# Altium footprint library LimeMicroAltiumLib.PcbLib: 876 footprints (part 50 of 57)
Each footprint in its own frame and in the unit in brackets; x right, y up, seen from the top. Pads: shape width x height; smd on the part's side, far side on the other; paste and mask are expansions set on the pad; w line width, h text height; cw(c..) or ccw(c..) is an arc to the next point about the centre after c.
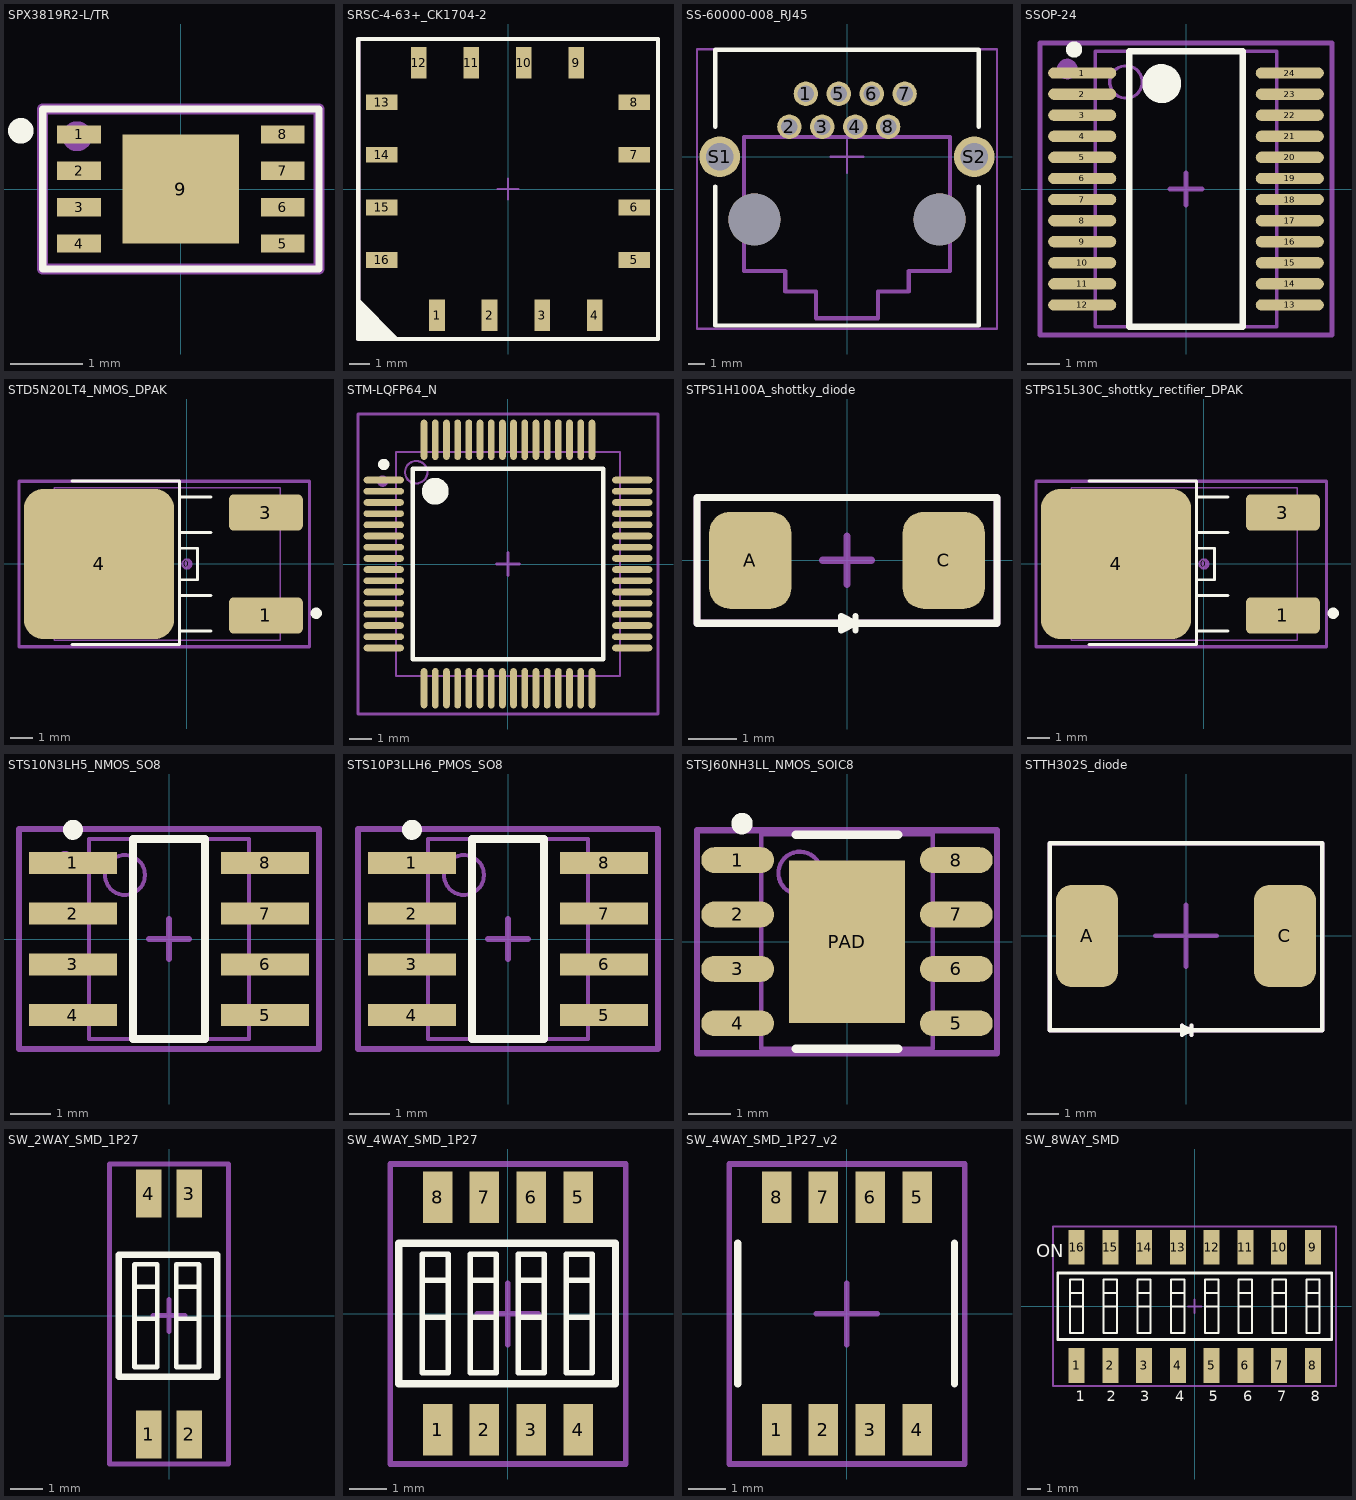
[diagram p49: the footprints below, top view; thin cyan lines are the x and y axes]

## SPX3819R2-L/TR [mm]
pads (9):
  rect 0.6x0.25 smd mask+0.05: 1(-1.4,0.75) 2(-1.4,0.25) 3(-1.4,-0.25) 4(-1.4,-0.75) 5(1.4,-0.75) 6(1.4,-0.25) 7(1.4,0.25) 8(1.4,0.75)
  rect 1.6x1.5 smd: 9(0,0)
Top Overlay:
  circle w0.3: c-2.2,0.8 r0.025
  lines w0.1: -1.9,-1.1 -1.9,1.1 1.9,1.1 1.9,-1.1 -1.9,-1.1
Mechanical 15:
  circle w0.3: c-1.425,0.725 r0.056
  lines w0.15: -0.25,0 0,0 ; 0,-0.25 0,0 ; 0,0.25 0,0 ; 0.25,0 0,0 ; -1.9,-1.1 1.9,-1.1 1.9,1.1 -1.9,1.1 -1.9,-1.1
  text ".Designator" at 0,0 h0.55
3D body "User Library-DFN-8 DCB.step": height 0.75, standoff 0, extent -1.51,-1 1.51,1

## SRSC-4-63+_CK1704-2 [mm]
pads (16):
  rect 0.76x1.52 smd: 1(-3.43,-6.1) 2(-0.89,-6.1) 3(1.65,-6.1) 4(4.19,-6.1) 9(3.3,6.1) 10(0.76,6.1) 11(-1.78,6.1) 12(-4.32,6.1)
  rect 1.52x0.76 smd: 5(6.1,-3.43) 6(6.1,-0.89) 7(6.1,1.65) 8(6.1,4.19) 13(-6.1,4.19) 14(-6.1,1.65) 15(-6.1,-0.89) 16(-6.1,-3.43)
Top Overlay:
  region: -5.25,-7.25 -7.25,-5.25 -7.25,-7.25
  lines w0.2: -7.24,-7.25 -7.24,7.25 7.25,7.25 7.25,-7.25 -7.24,-7.25
Mechanical 15:
  circle w0.254: c-3.5,-6 r0.056
  lines w0.1: -0.5,0 0,0 ; 0,-0.5 0,0 ; 0,0.5 0,0 ; 0.5,0 0,0
  lines w0.2: -7.24,-7.25 7.25,-7.25 7.25,7.25 -7.24,7.25 -7.24,-7.25
  text ".Designator" at 0,0 h0.55
3D body "User Library-ROS-425-319 in CK605 case detailed.STEP": height 4.57, standoff 0, extent -6.35,-6.35 6.35,6.35

## SS-60000-008_RJ45 [mm]
pads (12):
  round 1.5 hole 1: 1(-2.54,3.873) 2(-3.556,1.841) 3(-1.524,1.841) 4(0.508,1.841) 5(-0.508,3.873) 6(1.524,3.873) 7(3.556,3.873) 8(2.54,1.841)
  round 2.515 hole 1.7: S1(-7.849,-0.013) S2(7.849,-0.013)
  round 3.2 hole 3.2 unplated: ""(-5.715,-3.873) ""(5.715,-3.873)
Top Overlay:
  lines w0.254: -8.128,-1.841 -8.128,-10.427 8.128,-10.427 8.128,-1.841 ; -8.128,1.841 -8.128,6.591 8.128,6.591 8.128,1.841
Mechanical 13:
  lines w0.254: -6.35,-7.048 -6.35,1.206 6.35,1.206 6.35,-7.048 3.81,-7.048 3.81,-8.319 1.905,-8.319 1.905,-9.97 -1.905,-9.97 -1.905,-8.319 -3.81,-8.319 -3.81,-7.048 -6.35,-7.048
Mechanical 15:
  lines w0.15: -1,0 0,0 ; 0,-1 0,0 ; 0,1 0,0 ; 1,0 0,0 ; -9.25,-10.623 -9.25,6.626 9.25,6.626 9.25,-10.623 -9.25,-10.623
  text ".Designator" at 0,0 h0.55
3D body "SS-60000-008.stp": height 16.62, standoff -3.96, extent -8.001,-10.365 8.001,6.374

## SSOP-24 [mm] "SOP, 24-Leads, Body 8,5x5,6mm (max), Pitch 0,65mm, IPC Medium Density"
height 2
pads (24):
  oval 2.1x0.35 smd: 1(-3.2,3.575) 2(-3.2,2.925) 3(-3.2,2.275) 4(-3.2,1.625) 5(-3.2,0.975) 6(-3.2,0.325) 7(-3.2,-0.325) 8(-3.2,-0.975) 9(-3.2,-1.625) 10(-3.2,-2.275) 11(-3.2,-2.925) 12(-3.2,-3.575) 13(3.2,-3.575) 14(3.2,-2.925) 15(3.2,-2.275) 16(3.2,-1.625) 17(3.2,-0.975) 18(3.2,-0.325) 19(3.2,0.325) 20(3.2,0.975) 21(3.2,1.625) 22(3.2,2.275) 23(3.2,2.925) 24(3.2,3.575)
Top Overlay:
  circle w0.25: c-3.45,4.3 r0.125
  circle w0.6: c-0.75,3.25 r0.3
  lines w0.2: -1.75,-4.25 -1.75,4.25 1.75,4.25 1.75,-4.25 -1.75,-4.25
Mechanical 13:
  circle w0.1: c-1.85,3.3 r0.5
  lines w0.1: -2.8,-4.25 -2.8,4.25 2.8,4.25 2.8,-4.25 -2.8,-4.25
Mechanical 15:
  circle w0.35: c-3.659,3.7 r0.141
  lines w0.15: -0.5,0 0.5,0 ; 0,-0.5 0,0.5 ; -4.5,-4.5 -4.5,4.5 4.5,4.5 4.5,-4.5 -4.5,-4.5
  text ".designator" at 0,0 h0.55
3D body "SOP65P640X110-24N.STEP": height 1.2, standoff 0, extent -3.25,-3.95 3.25,3.95

## STD5N20LT4_NMOS_DPAK [mm] "D-PAK/TO-263-3; 3 Leads (1 Cropped); Body 14.7 (inc. leads) x 10.2 mm (LxW max)"
height 4.572
pads (4):
  round 0.508 on Mech15: 0(0,0)
  rrect25% 3.3x1.6 smd: 1(3.526,-2.3) 3(3.526,2.3)
  rrect25% 6.7x6.7 smd: 4(-3.926,0)
Top Overlay:
  circle w0.25: c5.774,-2.2 r0.125
  lines w0.127: -5.126,-3.6 -0.326,-3.6 -0.326,3.7 -5.126,3.7 ; 1.074,-3 -0.326,-3 -0.326,-1.4 1.074,-1.4 ; 1.074,1.4 -0.326,1.4 -0.326,3 1.074,3 ; -0.326,-0.7 0.474,-0.7 0.474,0.7 -0.326,0.7 -0.326,-0.7
Mechanical 13:
  lines w0.076: -5.928,-3.4 -5.928,3.4 4.174,3.4 4.174,-3.4 -5.928,-3.4
Mechanical 15:
  circle w0.3: c3.674,-2.2 r0.1
  lines w0.15: -7.5,-3.7 5.474,-3.7 5.474,3.7 -7.5,3.7 -7.5,-3.7
  text ".Designator" at 0,0 h0.55
3D body "User Library-DPAK_TO-252AA.step": height 2.37, standoff -0.03, extent -5.928,-3.367 4.172,3.367

## STM-LQFP64_N [mm] "Thin QFP, 64-Leads, Body 10x10mm, Pitch 0.5mm, IPC Medium Density"
height 1.6
pads (64):
  oval 1.8x0.3 smd mask+0.05: 1(-5.55,3.75) 2(-5.55,3.25) 3(-5.55,2.75) 4(-5.55,2.25) 5(-5.55,1.75) 6(-5.55,1.25) 7(-5.55,0.75) 8(-5.55,0.25) 9(-5.55,-0.25) 10(-5.55,-0.75) 11(-5.55,-1.25) 12(-5.55,-1.75) 13(-5.55,-2.25) 14(-5.55,-2.75) 15(-5.55,-3.25) 16(-5.55,-3.75) 33(5.55,-3.75) 34(5.55,-3.25) 35(5.55,-2.75) 36(5.55,-2.25) 37(5.55,-1.75) 38(5.55,-1.25) 39(5.55,-0.75) 40(5.55,-0.25) 41(5.55,0.25) 42(5.55,0.75) 43(5.55,1.25) 44(5.55,1.75) 45(5.55,2.25) 46(5.55,2.75) 47(5.55,3.25) 48(5.55,3.75)
  oval 0.3x1.8 smd mask+0.05: 17(-3.75,-5.55) 18(-3.25,-5.55) 19(-2.75,-5.55) 20(-2.25,-5.55) 21(-1.75,-5.55) 22(-1.25,-5.55) 23(-0.75,-5.55) 24(-0.25,-5.55) 25(0.25,-5.55) 26(0.75,-5.55) 27(1.25,-5.55) 28(1.75,-5.55) 29(2.25,-5.55) 30(2.75,-5.55) 31(3.25,-5.55) 32(3.75,-5.55) 49(3.75,5.55) 50(3.25,5.55) 51(2.75,5.55) 52(2.25,5.55) 53(1.75,5.55) 54(1.25,5.55) 55(0.75,5.55) 56(0.25,5.55) 57(-0.25,5.55) 58(-0.75,5.55) 59(-1.25,5.55) 60(-1.75,5.55) 61(-2.25,5.55) 62(-2.75,5.55) 63(-3.25,5.55) 64(-3.75,5.55)
Top Overlay:
  circle w0.6: c-3.25,3.25 r0.3
  circle w0.25: c-5.55,4.45 r0.125
  lines w0.2: -4.25,-4.25 4.25,-4.25 4.25,4.25 -4.25,4.25 -4.25,-4.25
Mechanical 13:
  circle w0.1: c-4.1,4.1 r0.5
  lines w0.1: -5,-5 5,-5 5,5 -5,5 -5,-5
Mechanical 15:
  circle w0.25: c-5.6,3.7 r0.125
  lines w0.15: -0.5,0 0.5,0 ; 0,-0.5 0,0.5 ; -6.7,-6.7 6.7,-6.7 6.7,6.7 -6.7,6.7 -6.7,-6.7
  text ".Designator" at 0,0 h0.55
3D body "LQFP-64.STEP": height 1.6, standoff 0, extent -6,-6 6,6

## STPS1H100A_shottky_diode [mm]
pads (2):
  rrect50% 1.7x2 smd mask+0.05: A(-2,0) C(2,0)
Top Overlay:
  lines w0.127: -0.125,-1.3 0.175,-1.3 ; 0.175,-1.45 0.175,-1.15 ; 0.175,-1.3 -0.125,-1.45 -0.125,-1.15 0.175,-1.3
  lines w0.15: -3.1,-1.3 3.1,-1.3 3.1,1.3 -3.1,1.3 -3.1,-1.3
Mechanical 15:
  lines w0.15: -0.5,0 0,0 ; 0,-0.5 0,0 ; 0,0.5 0,0 ; 0.5,0 0,0 ; -3.1,-1.3 3.1,-1.3 3.1,1.3 -3.1,1.3 -3.1,-1.3
  text ".Designator" at -0.2,-0.2 h0.55
  text "C" at 1.7,-0.4 h0.55
  text "A" at -2.4,-0.5 h0.55
3D body "User Library-Diode Molded Body.step": height 2.89, standoff -0.03, extent -2.65,-1.3 2.65,1.3

## STPS15L30C_shottky_rectifier_DPAK [mm] "D-PAK/TO-263-3; 3 Leads (1 Cropped); Body 14.7 (inc. leads) x 10.2 mm (LxW max)"
height 4.572
pads (4):
  round 0.508 on Mech15: 0(0,0)
  rrect25% 3.3x1.6 smd: 1(3.526,-2.3) 3(3.526,2.3)
  rrect25% 6.7x6.7 smd: 4(-3.926,0)
Top Overlay:
  circle w0.25: c5.774,-2.2 r0.125
  lines w0.127: -5.126,-3.6 -0.326,-3.6 -0.326,3.7 -5.126,3.7 ; 1.074,-3 -0.326,-3 -0.326,-1.4 1.074,-1.4 ; 1.074,1.4 -0.326,1.4 -0.326,3 1.074,3 ; -0.326,-0.7 -0.326,0.7 0.474,0.7 0.474,-0.7 -0.326,-0.7
Mechanical 13:
  lines w0.076: -5.928,-3.4 4.174,-3.4 4.174,3.4 -5.928,3.4 -5.928,-3.4
Mechanical 15:
  circle w0.3: c3.674,-2.2 r0.1
  lines w0.15: -7.5,-3.7 -7.5,3.7 5.474,3.7 5.474,-3.7 -7.5,-3.7
  text ".Designator" at 0,0 h0.55
3D body "User Library-DPAK_TO-252AA.step": height 2.37, standoff -0.03, extent -5.928,-3.367 4.172,3.367

## STS10N3LH5_NMOS_SO8 [mm] "SOIC, 8-Leads, Body 4,90x3,90mm, Pitch 1,27mm, IPC Medium Density"
height 1.7
pads (8):
  rect 2.2x0.55 smd: 1(-2.4,1.905) 2(-2.4,0.635) 3(-2.4,-0.635) 4(-2.4,-1.905) 5(2.4,-1.905) 6(2.4,-0.635) 7(2.4,0.635) 8(2.4,1.905)
Top Overlay:
  circle w0.25: c-2.4,2.73 r0.125
  lines w0.2: -0.9,-2.5 -0.9,2.5 0.9,2.5 0.9,-2.5 -0.9,-2.5
Mechanical 13:
  circle w0.1: c-1.1,1.6 r0.5
  lines w0.1: -2,-2.5 -2,2.5 2,2.5 2,-2.5 -2,-2.5
Mechanical 15:
  circle w0.2: c-2.6,2 r0.1
  lines w0.15: -0.5,0 0.5,0 ; 0,-0.5 0,0.5 ; -3.75,-2.75 -3.75,2.75 3.75,2.75 3.75,-2.75 -3.75,-2.75
  text ".Designator" at 0,0 h0.55
3D body "CircuitWorks-SO-8.step": height 1.45, standoff 0, extent -2.889,-2.45 2.889,2.452

## STS10P3LLH6_PMOS_SO8 [mm] "SOIC, 8-Leads, Body 4,90x3,90mm, Pitch 1,27mm, IPC Medium Density"
height 1.7
pads (8):
  rect 2.2x0.55 smd: 1(-2.4,1.905) 2(-2.4,0.635) 3(-2.4,-0.635) 4(-2.4,-1.905) 5(2.4,-1.905) 6(2.4,-0.635) 7(2.4,0.635) 8(2.4,1.905)
Top Overlay:
  circle w0.25: c-2.4,2.73 r0.125
  lines w0.2: -0.9,-2.5 -0.9,2.5 0.9,2.5 0.9,-2.5 -0.9,-2.5
Mechanical 13:
  circle w0.1: c-1.1,1.6 r0.5
  lines w0.1: -2,-2.5 -2,2.5 2,2.5 2,-2.5 -2,-2.5
Mechanical 15:
  circle w0.2: c-2.5,1.9 r0.1
  lines w0.15: -0.5,0 0.5,0 ; 0,-0.5 0,0.5 ; -3.75,-2.75 -3.75,2.75 3.75,2.75 3.75,-2.75 -3.75,-2.75
  text ".Designator" at 0,0 h0.55
3D body "CircuitWorks-SO-8.step": height 1.45, standoff 0, extent -2.889,-2.45 2.889,2.452

## STSJ60NH3LL_NMOS_SOIC8 [mm] "8-Pin Small Outline Integrated Circuit 1.27 mm Pitch"
height 1.55
pads (9):
  oval 1.7x0.6 smd mask+0.05: 1(-2.55,1.905) 2(-2.55,0.635) 3(-2.55,-0.635) 4(-2.55,-1.905) 5(2.55,-1.905) 6(2.55,-0.635) 7(2.55,0.635) 8(2.55,1.905)
  rect 2.7x3.8 smd mask+0.05: PAD(0,0)
Top Overlay:
  circle w0.25: c-2.45,2.755 r0.125
  lines w0.2: -1.2,-2.5 1.2,-2.5 ; -1.2,2.5 1.2,2.5
Mechanical 13:
  circle w0.1: c-1.1,1.6 r0.5
  lines w0.1: -2,-2.5 2,-2.5 2,2.5 -2,2.5 -2,-2.5
Mechanical 15:
  circle w0.35: c-2.6,1.9 r0.1
  lines w0.15: -0.5,0 0.5,0 ; 0,-0.5 0,0.5 ; -3.5,-2.6 3.5,-2.6 3.5,2.6 -3.5,2.6 -3.5,-2.6
  text ".Designator" at 0,0 h0.55
3D body "SOIC-8.STEP": height 1.75, standoff 0, extent -3,-2.45 3,2.45

## STTH302S_diode [mm]
pads (2):
  rrect50% 2x3.3 smd mask+0.05: A(-3.2,0) C(3.2,0)
Top Overlay:
  lines w0.127: -0.125,-3.05 0.175,-3.05 ; 0.175,-3.2 0.175,-2.9 ; 0.175,-3.05 -0.125,-3.2 -0.125,-2.9 0.175,-3.05
  lines w0.15: -4.4,-3.05 4.4,-3.05 4.4,3 -4.4,3 -4.4,-3.05
Mechanical 15:
  lines w0.127: -0.125,-3.05 0.175,-3.05 ; 0.175,-3.2 0.175,-2.9 ; 0.175,-3.05 -0.125,-2.9 -0.125,-3.2 0.175,-3.05
  lines w0.15: -1,0 0,0 ; 0,-1 0,0 ; 0,1 0,0 ; 1,0 0,0 ; -4.4,-3.05 4.4,-3.05 4.4,3 -4.4,3 -4.4,-3.05
  text "C" at 2.9,-0.5 h0.55
  text "A" at -3.5,-0.5 h0.55
  text ".Designator" at 0,0 h0.55
3D body "User Library-DO-214AB SMC.step": height 2.3, standoff 0, extent -3.975,-2.95 3.975,2.95

## SW_2WAY_SMD_1P27 [mm] "DIP Switch; 16 Leads, 1.27 pitch"
height 5.06
pads (4):
  rect 0.8x1.5 smd: 1(-0.635,-3.7) 2(0.635,-3.7) 3(0.635,3.8) 4(-0.635,3.8)
Top Overlay:
  lines w0.15: -1.075,-0.1 -0.365,-0.1 ; -1.075,0.9 -0.365,0.9 ; 0.225,-0.1 0.935,-0.1 ; 0.225,0.9 0.935,0.9 ; -1.075,-1.6 -1.075,1.6 -0.365,1.6 -0.365,-1.6 -1.075,-1.6 ; 0.225,-1.6 0.935,-1.6 0.935,1.6 0.225,1.6 0.225,-1.6
  lines w0.2: -1.565,-1.9 -1.565,1.9 1.51,1.9 1.51,-1.9 -1.565,-1.9
Mechanical 15:
  lines w0.15: -0.5,0 0,0 ; 0,-0.5 0,0 ; 0,0.5 0,0 ; 0.5,0 0,0 ; -1.85,-4.625 -1.85,4.725 1.85,4.725 1.85,-4.625 -1.85,-4.625
  text "1" at -0.725,-3.875 h0.55
  text ".Designator" at -0.115,-0.1 h0.55
3D body "switch_a-dshp-02.stp": height 1.9, standoff 0, extent -1.79,-4 1.79,4

## SW_4WAY_SMD_1P27 [mm] "DIP Switch; 8 Leads, 1.27 pitch"
height 5.06
pads (8):
  rect 0.8x1.4 smd: 1(-1.905,-3.15) 2(-0.635,-3.15) 3(0.635,-3.15) 4(1.905,-3.15) 5(1.905,3.15) 6(0.635,3.15) 7(-0.635,3.15) 8(-1.905,3.15)
Top Overlay:
  lines w0.15: -2.32,-0.1 -1.61,-0.1 ; -2.32,0.9 -1.61,0.9 ; -1.02,-0.1 -0.31,-0.1 ; -1.02,0.9 -0.31,0.9 ; 0.28,-0.1 0.99,-0.1 ; 0.28,0.9 0.99,0.9 ; 1.58,-0.1 2.29,-0.1 ; 1.58,0.9 2.29,0.9 ; -2.32,-1.6 -2.32,1.6 -1.61,1.6 -1.61,-1.6 -2.32,-1.6 ; -1.02,-1.6 -0.31,-1.6 -0.31,1.6 -1.02,1.6 -1.02,-1.6 ; 0.28,-1.6 0.28,1.6 0.99,1.6 0.99,-1.6 0.28,-1.6 ; 1.58,-1.6 2.29,-1.6 2.29,1.6 1.58,1.6 1.58,-1.6
  lines w0.2: -2.96,-1.9 -2.96,1.9 2.915,1.9 2.915,-1.9 -2.96,-1.9
Mechanical 15:
  lines w0.15: -0.825,0 0,0 ; 0,-0.85 0,-0.025 ; 0,0.825 0,0 ; 0.825,0 0,0 ; -3.185,-4.075 -3.185,4.05 3.19,4.05 3.19,-4.075 -3.185,-4.075
  text "8" at -2.21,2.675 h0.55
  text "1" at -2.06,-3.4 h0.55
  text ".Designator" at 0,-0.025 h0.55
3D body "User Library-Diptronics_DHN4.STEP": height 1.5, standoff 0, extent -3.15,-3.538 3.16,3.438

## SW_4WAY_SMD_1P27_v2 [mm] "DIP Switch; 8 Leads, 1.27 pitch"
height 5.06
pads (8):
  rect 0.8x1.4 smd: 1(-1.905,-3.15) 2(-0.635,-3.15) 3(0.635,-3.15) 4(1.905,-3.15) 5(1.905,3.15) 6(0.635,3.15) 7(-0.635,3.15) 8(-1.905,3.15)
Top Overlay:
  lines w0.2: -2.96,-1.9 -2.96,1.9 ; 2.915,-1.9 2.915,1.9
Mechanical 15:
  lines w0.15: -0.825,0 0,0 ; 0,-0.85 0,-0.025 ; 0,0.825 0,0 ; 0.825,0 0,0 ; -3.185,-4.075 -3.185,4.05 3.19,4.05 3.19,-4.075 -3.185,-4.075
  text "8" at -2.21,2.675 h0.55
  text "1" at -2.06,-3.4 h0.55
  text ".Designator" at 0,-0.025 h0.55
3D body "User Library-Diptronics_DHN4.STEP": height 1.5, standoff 0, extent -3.15,-3.538 3.16,3.438

## SW_8WAY_SMD [mm] "DIP Switch; 16 Leads"
height 5.06
pads (16):
  rect 1.2x2.6 smd: 1(-8.89,-4.45) 2(-6.35,-4.45) 3(-3.81,-4.45) 4(-1.27,-4.45) 5(1.27,-4.45) 6(3.81,-4.45) 7(6.35,-4.45) 8(8.89,-4.45) 9(8.89,4.45) 10(6.35,4.45) 11(3.81,4.45) 12(1.27,4.45) 13(-1.27,4.45) 14(-3.81,4.45) 15(-6.35,4.45) 16(-8.89,4.45)
Top Overlay:
  lines w0.15: -9.39,0 -8.39,0 ; -9.39,1 -8.39,1 ; -6.85,0 -5.85,0 ; -6.85,1 -5.85,1 ; -4.31,0 -3.31,0 ; -4.31,1 -3.31,1 ; -1.77,0 -0.77,0 ; -1.77,1 -0.77,1 ; 0.77,0 1.77,0 ; 0.77,1 1.77,1 ; 3.31,0 4.31,0 ; 3.31,1 4.31,1 ; 5.85,0 6.85,0 ; 5.85,1 6.85,1 ; 8.39,0 9.39,0 ; 8.39,1 9.39,1 ; -9.39,-2 -9.39,2 -8.39,2 -8.39,-2 -9.39,-2 ; -6.85,-2 -6.85,2 -5.85,2 -5.85,-2 -6.85,-2 ; -4.31,-2 -4.31,2 -3.31,2 -3.31,-2 -4.31,-2 ; -1.77,-2 -1.77,2 -0.77,2 -0.77,-2 -1.77,-2 ; 0.77,-2 0.77,2 1.77,2 1.77,-2 0.77,-2 ; 3.31,-2 3.31,2 4.31,2 4.31,-2 3.31,-2 ; 5.85,-2 5.85,2 6.85,2 6.85,-2 5.85,-2 ; 8.39,-2 8.39,2 9.39,2 9.39,-2 8.39,-2
  lines w0.2: -10.29,-2.5 -10.29,2.5 10.31,2.5 10.31,-2.5 -10.29,-2.5
  text "6" at 3.644,-7.157 h0.8
  text "5" at 1.044,-7.157 h0.8
  text "4" at -1.481,-7.157 h0.8
  text "3" at -4.106,-7.157 h0.8
  text "2" at -6.606,-7.157 h0.8
  text "1" at -8.931,-7.157 h0.8
  text "ON" at -11.938,3.678 h1
  text "7" at 6.194,-7.157 h0.8
  text "8" at 8.734,-7.157 h0.8
Mechanical 15:
  lines w0.15: -0.5,0 0,0 ; 0,-0.5 0,0 ; 0,0.5 0,0 ; 0.5,0 0,0 ; -10.65,-6 -10.65,6 10.625,6 10.625,-6 -10.65,-6
  text ".Designator" at 0,0 h0.55
3D body "19728.stp": height 3.7, standoff 0, extent -10.63,-4.9 10.63,4.9